# Altium schematic symbol library TC264.SCHLIB: 72 symbols
Pins are listed as number, name and electrical type; pins without a type are passive.

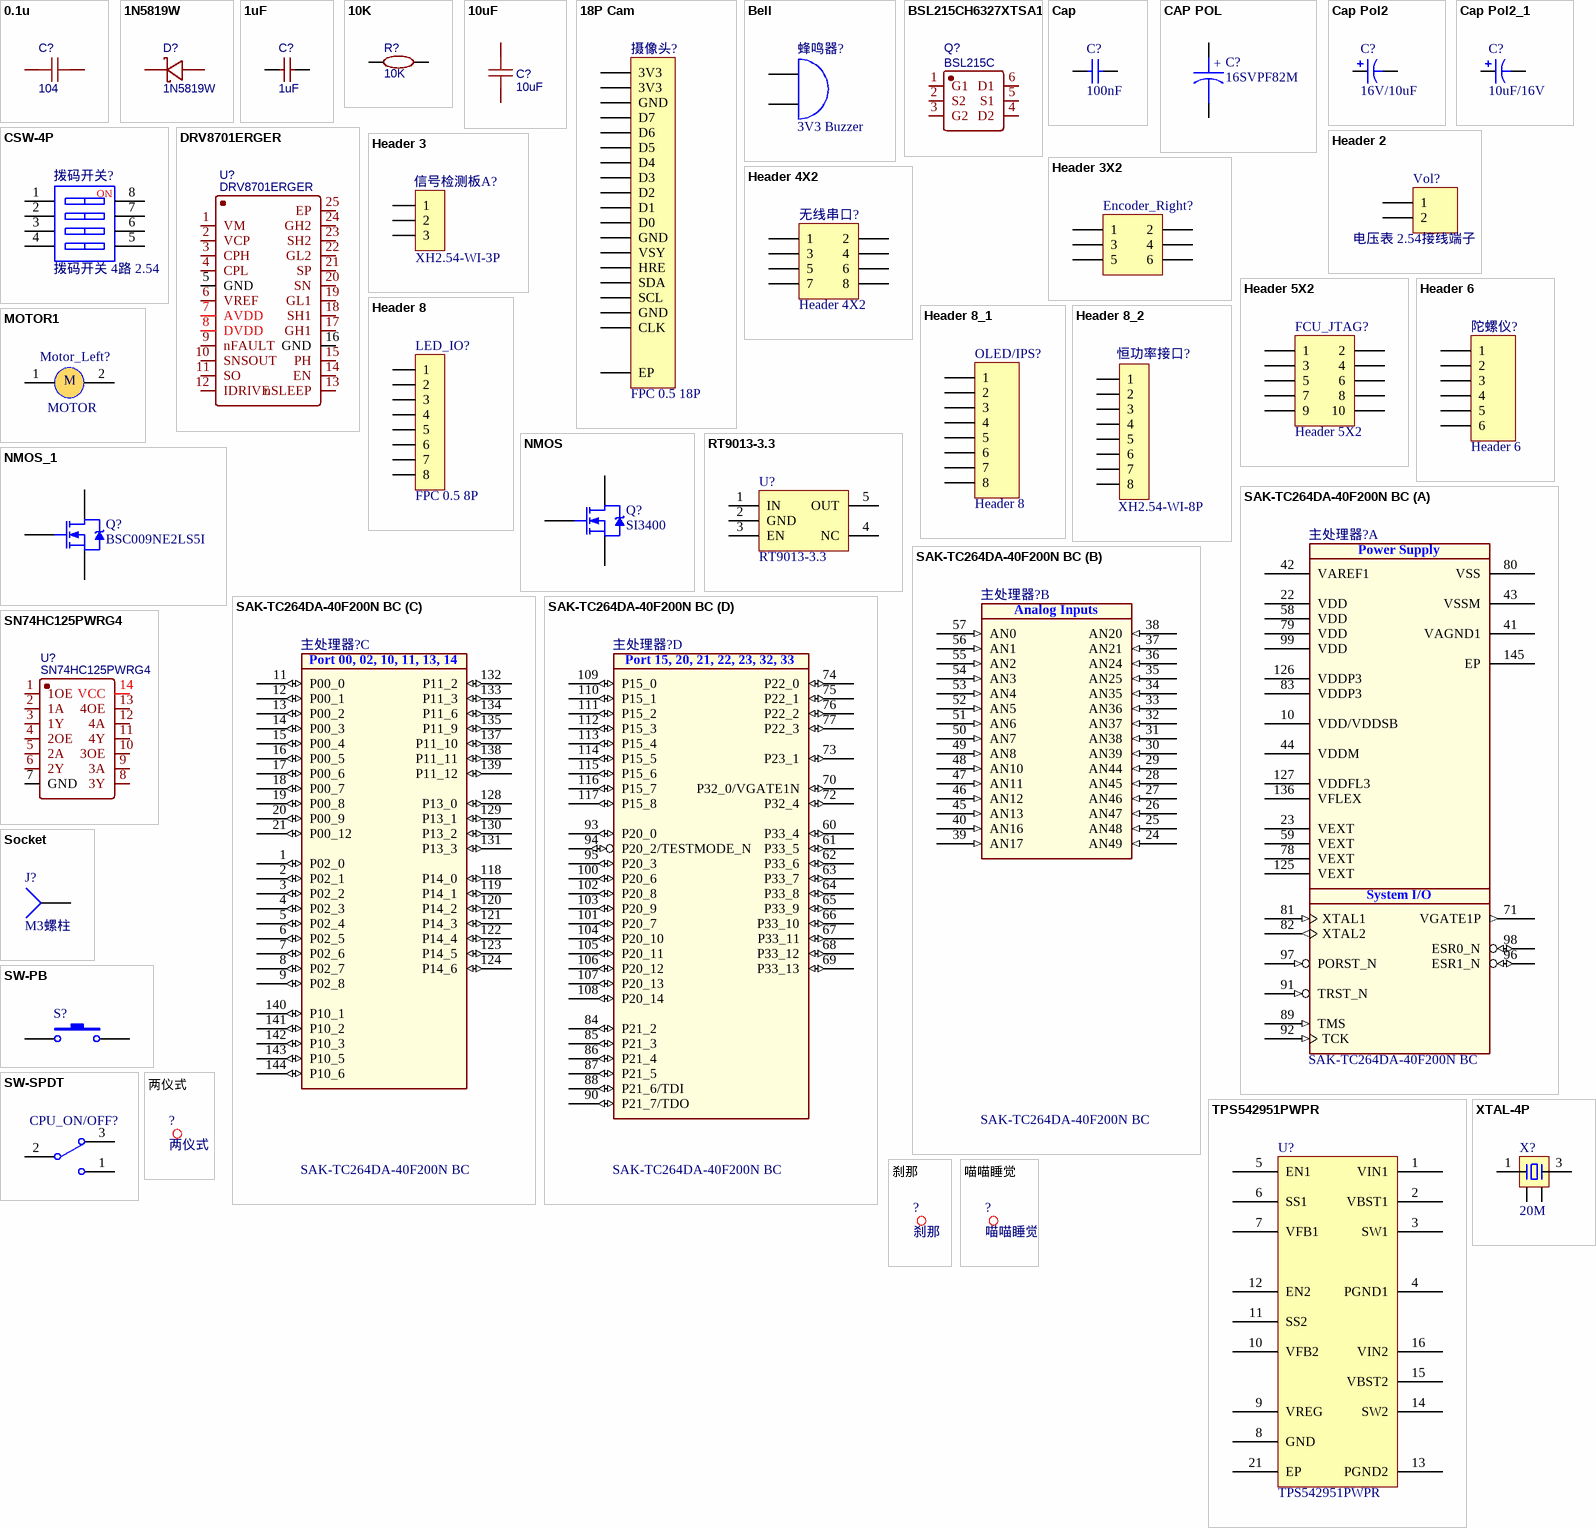
[diagram p0: symbols 0.1u to 喵喵睡觉]

## 0.1u
designator C?, comment 104
nameAlias: Value(F); Contributor: LCEDA_Lib; spicePre: C; spiceSymbolName: C_0603_US
footprint C0603
pins: 1, 2

## 1N5819W
designator D?
BOM_Manufacturer: Shandong Jingdao Microelectronics; Contributor: LCSC; BOM_Supplier: LCSC; BOM_Supplier Part: C169540; BOM_Manufacturer Part: 1N5819W; BOM_JLCPCB Part Class: Extended Part; spicePre: D; spiceSymbolName: 1N5819W
footprint SOD-123F_L2.8-W1.8-LS3.7-RD
pins: 1, 2

## 1uF
designator C?
BOM_Manufacturer Part: CL10B105KO8NNNC; BOM_Manufacturer: SAMSUNG; nameAlias: Capacitance; BOM_Supplier: LCSC; BOM_Supplier Part: C59782; BOM_JLCPCB Part Class: Extended Part; spicePre: C; spiceSymbolName: CL10B105KO8NNNC
footprint C0603
pins: 1, 2

## 10K
designator R?
BOM_Manufacturer: YAGEO; BOM_Manufacturer Part: RT0603BRD0710KL; nameAlias: Resistance (Ohms); Resistance: 10kΩ; BOM_Supplier: LCSC; BOM_Supplier Part: C95204; BOM_JLCPCB Part Class: Extended Part; spicePre: R; spiceSymbolName: RT0603BRD0710KL
footprint R0603
pins: 1, 2

## 10uF
designator C?
BOM_Manufacturer: Huaxin S&T; BOM_Manufacturer Part: 0805F106Z160CT; nameAlias: Capacitance; Contributor: LCSC; BOM_Supplier: LCSC; BOM_Supplier Part: C303921; BOM_JLCPCB Part Class: Extended Part; spicePre: C; spiceSymbolName: 0805F106Z160CT
footprint C0805
pins: 1, 2

## 18P Cam
designator 摄像头?, comment FPC 0.5 18P
Header, 25-Pin; LatestRevisionDate: 17-Jul-2002; LatestRevisionNote: Re-released for DXP Platform.; Publisher: Altium Limited
signal-integrity model Connector
footprint FPC0.5 2H-WS-18P (长：13.2mm，宽：5.2mm，高：2mm)
footprint FPC0.5 2H-WS-18P (长：13.2mm，宽：5.2mm，高：2mm)
pins: 0 EP, 1 3V3, 2 3V3, 3 GND, 4 D7, 5 D6, 6 D5, 7 D4, 8 D3, 9 D2, 10 D1, 11 D0, 12 GND, 13 VSY, 14 HRE, 15 SDA, 16 SCL, 17 GND, 18 CLK

## Bell
designator 蜂鸣器?, comment 3V3 Buzzer
Electrical Bell; Published: 24-Mar-1999; LatestRevisionDate: 17-Jul-2002; LatestRevisionNote: Re-released for DXP Platform.; PackageReference: PIN2; Publisher: Altium Limited
footprint 7.5mm 蜂鸣器
footprint 贴片有源蜂鸣器 9.6x9.6x5
pins: 1 A, 2 B

## BSL215CH6327XTSA1
designator Q?, comment BSL215C
BOM_Manufacturer: Infineon; BOM_Manufacturer Part: BSL215CH6327XTSA1; Contributor: LCSC; BOM_Supplier: LCSC; BOM_Supplier Part: C150914; BOM_JLCPCB Part Class: Extended Part; spicePre: Q; spiceSymbolName: BSL215CH6327XTSA1
footprint TSOP-6_L3.0-W1.5-P0.95-LS2.8-BL
footprint SOT23-6
pins: 1 G1, 2 S2, 3 G2, 4 D2, 5 S1, 6 D1

## Cap
designator C?, comment 100nF
Capacitor; Published: 8-Jun-2000; LatestRevisionDate: 17-Jul-2002; LatestRevisionNote: Re-released for DXP Platform.; PackageReference: RAD-0.3; Publisher: Altium Limited; PackageDescription: Radial Cap, Thru-Hole; 2 Leads; 0.3 in Pin Spacing
simulation model CAP (Capacitor)
signal-integrity model Cap
footprint 0603 电容 C3
pins: 1, 2

## CAP POL
designator C?, comment 16SVPF82M
Capacitor
footprint CT 8*7 - V (直径8mm，高7mm)
footprint CAP 5.0*12.5*20-H - GD (脚距5mm直径12.5mm高度20mm)
footprint CAP 3.5*8*11.5 - BK (脚距3.5mm直径8mm高度11.5mm)
footprint CAP 2.5*6.3*11.2 (脚距2.5mm直径6.3mm高度11.2mm)
pins: 1, 2
text: +

## Cap Pol2
designator C?, comment value 16V/10uF  (hidden comment: 10UF)
Polarized Capacitor (Axial); Published: 8-Jun-2000; LatestRevisionDate: 17-Jul-2002; LatestRevisionNote: Re-released for DXP Platform.; PackageReference: POLAR0.8; Publisher: Altium Limited; PackageDescription: Polarized Capacitor; 2 Leads
simulation model CAP (Capacitor)
signal-integrity model Cap Pol
footprint 0603 电容 C3
footprint C0805
pins: 1, 2
1 alternate drawing of the same symbol

## Cap Pol2_1
designator C?, comment 10UF  (value not drawn)
Polarized Capacitor (Axial); Published: 8-Jun-2000; LatestRevisionDate: 17-Jul-2002; LatestRevisionNote: Re-released for DXP Platform.; PackageReference: POLAR0.8; Publisher: Altium Limited; PackageDescription: Polarized Capacitor; 2 Leads
simulation model CAP (Capacitor)
signal-integrity model Cap Pol
footprint 0603 电容 C3
footprint C0805
pins: 1, 2
1 alternate drawing of the same symbol
text: 10uF/16V

## CSW-4P
designator 拨码开关?, comment 拨码开关 4路 2.54
4路编码开关; 版权归属: 源创客; BOM名称: 4路编码开关; 学习资源: www.ooocke.com
footprint CSW DIP-2P_G (6.6*9.9*7mm)
pins: 1, 2, 3, 4, 5, 6, 7, 8
text: NO

## DRV8701ERGER
designator U?
BOM_Manufacturer: Texas Instruments; Contributor: LCSC; BOM_Supplier: LCSC; BOM_Supplier Part: C90964; BOM_Manufacturer Part: DRV8701ERGER; BOM_JLCPCB Part Class: Extended Part; spicePre: U; spiceSymbolName: DRV8701ERGER
footprint VQFN-24_L4.0-W4.0-P0.50-BL-EP2.8
pins: 1 VM, 2 VCP, 3 CPH, 4 CPL, 5 GND, 6 VREF, 7 AVDD, 8 DVDD, 9 nFAULT, 10 SNSOUT, 11 SO, 12 IDRIVE, 13 nSLEEP, 14 EN, 15 PH, 16 GND, 17 GH1, 18 SH1, 19 GL1, 20 SN, 21 SP, 22 GL2, 23 SH2, 24 GH2, 25 EP

## Header 2
designator Vol?, comment 电压表 2.54接线端子
Header, 2-Pin; LatestRevisionDate: 17-Jul-2002; LatestRevisionNote: Re-released for DXP Platform.; Publisher: Altium Limited
signal-integrity model Connector
footprint XH2.54-LI-2P (接插件，2P)
pins: 1, 2

## Header 3
designator 信号检测板A?, comment XH2.54-WI-3P
3P接插件; 版权归属: 封装库来自淘宝 ID：黄晶宝石; BOM名称: 3P接插件; 学习资源: https://shop463601444.taobao.com
footprint XH2.54-WI-3P (接插件，3P)
footprint XH2.54-LI-3P (接插件，3P)
footprint HDR2.54-LI-3P (排针，3脚)
footprint HDR2.54-M-LI-3P (排母，3脚)
footprint HDR2.54-WI-3P (弯脚排针，3脚)
footprint HDR2.54-WS-3P (3P卧式贴片排针2.54)
footprint HDR2.54-Y-LI-3P (圆孔排母，3脚)
footprint HDR2.54-M-WS-3P (3P卧式贴片排母2.54)
footprint KF2510-LI-3P (接插件/2A)
footprint XH2.54-WS-3P (长：12.5mm，宽：8mm，高：6.1mm)
footprint XH2.54-LS-3P (长：12.5mm，宽：6mm，高：8.3mm)
footprint KF2EDGK-2.54-LI-3P (长：9.52mm，宽：8.1mm，高：10.1mm)
footprint KF2EDGK-2.54-WI-3P (长：9.52mm，宽：10.1mm，高：8.1mm)
pins: 1, 2, 3

## Header 3X2
designator Encoder_Right?  (value not drawn)
Header, 3-Pin, Dual row; LatestRevisionDate: 17-Jul-2002; LatestRevisionNote: Re-released for DXP Platform.; Publisher: Altium Limited
signal-integrity model Connector
footprint 2.54mm 6P 简易牛角座 (立式直插简牛插座，间距2.54（蒜米工坊）)
footprint DC-2.54-L-Z-6P (立式直插简牛插座，间距2.54（蒜米工坊）)
pins: 1, 2, 3, 4, 5, 6

## Header 4X2
designator 无线串口?
Header, 4-Pin, Dual row; LatestRevisionDate: 17-Jul-2002; LatestRevisionNote: Re-released for DXP Platform.; Publisher: Altium Limited
signal-integrity model Connector
footprint 2.54mm 4P*2排母 (排母，4脚)
pins: 1, 2, 3, 4, 5, 6, 7, 8

## Header 5X2
designator FCU_JTAG?
Header, 5-Pin, Dual row; LatestRevisionDate: 17-Jul-2002; LatestRevisionNote: Re-released for DXP Platform.; Publisher: Altium Limited
signal-integrity model Connector
footprint DC-2.54-L-Z-10P (立式直插简牛插座，间距2.54（蒜米工坊）)
pins: 1, 2, 3, 4, 5, 6, 7, 8, 9, 10

## Header 6
designator 陀螺仪?
Header, 6-Pin; LatestRevisionDate: 17-Jul-2002; LatestRevisionNote: Re-released for DXP Platform.; Publisher: Altium Limited
signal-integrity model Connector
footprint MX 1.25-WS-6P (长：12.65mm，宽：4.2mm，高：3.4mm)
pins: 1, 2, 3, 4, 5, 6

## Header 8
designator LED_IO?, comment FPC 0.5 8P
8P接插件; 版权归属: 封装库来自淘宝 ID：黄晶宝石; BOM名称: 8P接插件; 学习资源: https://shop463601444.taobao.com
footprint XH2.54-WI-8P (接插件，8P)
footprint XH2.54-LI-8P (接插件，8P)
footprint HDR2.54-LI-8P (排针，8脚)
footprint HDR2.54-M-LI-8P (排母，8脚)
footprint HDR2.54-WI-8P (弯脚排针，8脚)
footprint HDR2.54-WS-8P (8P卧式贴片排针2.54)
footprint HDR2.54-Y-LI-8P (圆孔排母，8脚)
footprint HDR2.54-M-WS-8P (8P卧式贴片排母2.54)
footprint KF2510-LI-8P (接插件/2A)
footprint XH2.54-WS-8P (长：25mm，宽：8mm，高：6.1mm)
footprint XH2.54-LS-8P (长：25mm，宽：6mm，高：8.3mm)
footprint KF2EDGK-2.54-LI-8P (长：22.22mm，宽：8.1mm，高：10.1mm)
footprint KF2EDGK-2.54-WI-8P (长：22.22mm，宽：10.1mm，高：8.1mm)
footprint FPC0.5 2H-WS-8P (长：8.2mm，宽：5.2mm，高：2mm 淘宝ID:黄晶宝石   店铺网址:https://shop463601444.taobao.com)
pins: 1, 2, 3, 4, 5, 6, 7, 8

## Header 8_1
designator OLED/IPS?, comment Header 8
Header, 8-Pin; LatestRevisionDate: 17-Jul-2002; LatestRevisionNote: Re-released for DXP Platform.; Publisher: Altium Limited
signal-integrity model Connector
footprint HDR2.54-LI-8P (排针，8脚)
pins: 1, 2, 3, 4, 5, 6, 7, 8

## Header 8_2
designator 恒功率接口?, comment XH2.54-WI-8P
8P接插件; 版权归属: 封装库来自淘宝 ID：黄晶宝石; BOM名称: 8P接插件; 学习资源: https://shop463601444.taobao.com
footprint XH2.54-WI-8P (接插件，8P)
footprint XH2.54-LI-8P (接插件，8P)
footprint HDR2.54-LI-8P (排针，8脚)
footprint HDR2.54-M-LI-8P (排母，8脚)
footprint XH2.54-WI-8P (接插件，8P)
footprint HDR2.54-WS-8P (8P卧式贴片排针2.54)
footprint HDR2.54-Y-LI-8P (圆孔排母，8脚)
footprint HDR2.54-M-WS-8P (8P卧式贴片排母2.54)
footprint KF2510-LI-8P (接插件/2A)
footprint XH2.54-WS-8P (长：25mm，宽：8mm，高：6.1mm)
footprint XH2.54-LS-8P (长：25mm，宽：6mm，高：8.3mm)
footprint KF2EDGK-2.54-LI-8P (长：22.22mm，宽：8.1mm，高：10.1mm)
footprint KF2EDGK-2.54-WI-8P (长：22.22mm，宽：10.1mm，高：8.1mm)
pins: 1, 2, 3, 4, 5, 6, 7, 8

## MOTOR1
designator Motor_Left?, comment MOTOR
footprint 5.08 2P 螺钉端子 (Terminal Block, 17.5A 400V, Pitch 5.08mm, 2 Positions, Screw Connection)
footprint XT30 母头 电源插头
pins: 1 (power), 2 (power)
text: M

## NMOS
designator Q?, comment SI3400
N-Channel Power MOSFET 40V 100A 1.8mΩ; Note: Pin 2 is electrically connected to pin 4.; Published: 8-Jun-2000; LatestRevisionDate: 17-Jul-2002; LatestRevisionNote: Re-released for DXP Platform.; DatasheetVersion: PD-9.814; PackageVersion: Feb-1997; PackageReference: TO-220AB; Publisher: Altium Limited; PackageDescription: TO, Thru-Hole, Vertical, Heatsink Mounted; 3 In-Line Leads; Pitch 2.54 mm; ComponentLink1Description: Manufacturer Link; ComponentLink1URL: http://www.irf.com/
simulation model IRF1010 (Spice Subcircuit)
footprint PSON-8 MOS
footprint SOT-23
pins: 1 G, 2 S, 3 D

## NMOS_1
designator Q?, comment BSC009NE2LS5I
N-Channel Power MOSFET 40V 100A 1.8mΩ; Note: Pin 2 is electrically connected to pin 4.; Published: 8-Jun-2000; LatestRevisionDate: 17-Jul-2002; LatestRevisionNote: Re-released for DXP Platform.; DatasheetVersion: PD-9.814; PackageVersion: Feb-1997; PackageReference: TO-220AB; Publisher: Altium Limited; PackageDescription: TO, Thru-Hole, Vertical, Heatsink Mounted; 3 In-Line Leads; Pitch 2.54 mm; ComponentLink1Description: Manufacturer Link; ComponentLink1URL: http://www.irf.com/
simulation model IRF1010 (Spice Subcircuit)
footprint PSON-8 MOS
footprint PSON-8 MOS
pins: 1 S, 2 G, 3 D

## RT9013-3.3
designator U?
3.3V电源芯片
footprint SOT23-5N (3x1.6x1.1mm(长宽高))
pins: 1 IN, 2 GND, 3 EN, 4 NC, 5 OUT

## SAK-TC264DA-40F200N BC
designator 主处理器?
32-Bit Single-Chip Microcontroller BC-Step; Manufacturer: Infineon Technologies; PackageReference: PG-LQFP-144-22; ManufacturerPartNumber: SAK-TC264DA-40F200N BC
footprint QFP144_EP (QFP,0.50mm pitch,square;144 pin,20.00mm L X 20.00mm W X 1.60mm H body (w/thermal tab))
part A pins: 10 VDD/VDDSB (power) "Emulation Device: Emulation SRAM Standby Power Supply (1.3V)", 22 VDD (power) "Digital Core Power Supply (1.3V)", 23 VEXT (power) "External Supply (5V / 3.3V)", 41 VAGND1 (power) "Negative Analog Reference Voltage 1", 42 VAREF1 (power) "Positive Analog Reference Voltage 1", 43 VSSM (power) "Analog Ground for VDDM", 44 VDDM (power) "ADC Analog Power Supply (3.3V / 5V)", 58 VDD (power) "Digital Core Power Supply (1.3V)", 59 VEXT (power) "External Supply (5V / 3.3V)", 71 VGATE1P (out) "External Pass Device gate control for EVR13", 78 VEXT (power) "External Supply (5V / 3.3V)", 79 VDD (power) "Digital Core Power Supply (1.3V)", 80 VSS (power) "Digital Ground", 81 XTAL1 (in) "Main Oscillator/PLL/Clock Generator Input", 82 XTAL2 (out) "Main Oscillator/PLL/Clock Generator Output", 83 VDDP3 (power) "Digital Power Supply for Oscillator, LVDSH and A2 pads (3.3V)", 89 TMS (in) "JTAG Module State Machine Control Input", 91 TRST_N (in) "JTAG Module Reset/Enable Input", 92 TCK (in) "JTAG Module Clock Input", 96 ESR1_N (io) "External System Request Reset 1", 97 PORST_N (in) "Power On Reset Input", 98 ESR0_N (io) "External System Request Reset 0", 99 VDD (power) "Digital Core Power Supply (1.3V)", 125 VEXT (power) "External Supply (5V / 3.3V)", 126 VDDP3 (power) "Digital Power Supply for Flash (3.3V)", 127 VDDFL3 (power) "Flash Power Supply (3.3V)", 136 VFLEX (power) "Digital Power Supply for Flex Port Pads (5V / 3.3V)", 145 EP (power) "Exposed Pad"
part B pins: 24 AN49 (in) "Analog input 49", 25 AN48 (in) "Analog input 48", 26 AN47 (in) "Analog input 47", 27 AN46 (in) "Analog input 46", 28 AN45 (in) "Analog input 45", 29 AN44 (in) "Analog input 44", 30 AN39 (in) "Analog input 39", 31 AN38 (in) "Analog input 38", 32 AN37 (in) "Analog input 37", 33 AN36 (in) "Analog input 36", 34 AN35 (in) "Analog input 35", 35 AN25 (in) "Analog input 25", 36 AN24 (in) "Analog input 24", 37 AN21 (in) "Analog input 21", 38 AN20 (in) "Analog input 20", 39 AN17 (in) "Analog input 17", 40 AN16 (in) "Analog input 16", 45 AN13 (in) "Analog input 13", 46 AN12 (in) "Analog input 12", 47 AN11 (in) "Analog input 11", 48 AN10 (in) "Analog input 10", 49 AN8 (in) "Analog input 8", 50 AN7 (in) "Analog input 7", 51 AN6 (in) "Analog input 6", 52 AN5 (in) "Analog input 5", 53 AN4 (in) "Analog input 4", 54 AN3 (in) "Analog input 3", 55 AN2 (in) "Analog input 2", 56 AN1 (in) "Analog input 1", 57 AN0 (in) "Analog input 0"
part C pins: 1 P02_0 (io) "General-purpose Input/Output", 2 P02_1 (io) "General-purpose Input/Output", 3 P02_2 (io) "General-purpose Input/Output", 4 P02_3 (io) "General-purpose Input/Output", 5 P02_4 (io) "General-purpose Input/Output", 6 P02_5 (io) "General-purpose Input/Output", 7 P02_6 (io) "General-purpose Input/Output", 8 P02_7 (io) "General-purpose Input/Output", 9 P02_8 (io) "General-purpose Input/Output", 11 P00_0 (io) "General-purpose Input/Output", 12 P00_1 (io) "General-purpose Input/Output", 13 P00_2 (io) "General-purpose Input/Output", 14 P00_3 (io) "General-purpose Input/Output", 15 P00_4 (io) "General-purpose Input/Output", 16 P00_5 (io) "General-purpose Input/Output", 17 P00_6 (io) "General-purpose Input/Output", 18 P00_7 (io) "General-purpose Input/Output", 19 P00_8 (io) "General-purpose Input/Output", 20 P00_9 (io) "General-purpose Input/Output", 21 P00_12 (io) "General-purpose Input/Output", 118 P14_0 (io) "General-purpose Input/Output", 119 P14_1 (io) "General-purpose Input/Output", 120 P14_2 (io) "General-purpose Input/Output", 121 P14_3 (io) "General-purpose Input/Output", 122 P14_4 (io) "General-purpose Input/Output", 123 P14_5 (io) "General-purpose Input/Output", 124 P14_6 (io) "General-purpose Input/Output", 128 P13_0 (io) "General-purpose Input/Output", 129 P13_1 (io) "General-purpose Input/Output", 130 P13_2 (io) "General-purpose Input/Output", 131 P13_3 (io) "General-purpose Input/Output", 132 P11_2 (io) "General-purpose Input/Output", 133 P11_3 (io) "General-purpose Input/Output", 134 P11_6 (io) "General-purpose Input/Output", 135 P11_9 (io) "General-purpose Input/Output", 137 P11_10 (io) "General-purpose Input/Output", 138 P11_11 (io) "General-purpose Input/Output", 139 P11_12 (io) "General-purpose Input/Output", 140 P10_1 (io) "General-purpose Input/Output", 141 P10_2 (io) "General-purpose Input/Output", 142 P10_3 (io) "General-purpose Input/Output", 143 P10_5 (io) "General-purpose Input/Output", 144 P10_6 (io) "General-purpose input/output"
part D pins: 60 P33_4 (io) "General-purpose Input/Output", 61 P33_5 (io) "General-purpose Input/Output", 62 P33_6 (io) "General-purpose Input/Output", 63 P33_7 (io) "General-purpose Input/Output", 64 P33_8 (io) "General-purpose Input/Output", 65 P33_9 (io) "General-purpose Input/Output", 66 P33_10 (io) "General-purpose Input/Output", 67 P33_11 (io) "General-purpose Input/Output", 68 P33_12 (io) "General-purpose Input/Output", 69 P33_13 (io) "General-purpose Input/Output", 70 P32_0/VGATE1N (io) "General-purpose Input/Output/SMPS mode: Analog Output", 72 P32_4 (io) "General-purpose Input/Output", 73 P23_1 (io) "General-purpose Input/Output", 74 P22_0 (io) "General-purpose Input/Output", 75 P22_1 (io) "General-purpose Input/Output", 76 P22_2 (io) "General-purpose Input/Output", 77 P22_3 (io) "General-purpose Input/Output", 84 P21_2 (io) "General-purpose Input/Output", 85 P21_3 (io) "General-purpose Input/Output", 86 P21_4 (io) "General-purpose Input/Output", 87 P21_5 (io) "General-purpose Input/Output", 88 P21_6/TDI (io) "General-purpose Input/Output/OCDS (JTAG) Input", 90 P21_7/TDO (io) "General-purpose Input/Output/OCDS (JTAG)", 93 P20_0 (io) "General-purpose Input/Output", 94 P20_2/TESTMODE_N (io) "General-purpose Input/Output/OCDS Input", 95 P20_3 (io) "General-purpose Input/Output", 100 P20_6 (io) "General-purpose Input/Output", 101 P20_7 (io) "General-purpose Input/Output", 102 P20_8 (io) "General-purpose Input/Output", 103 P20_9 (io) "General-purpose Input/Output", 104 P20_10 (io) "General-purpose Input/Output", 105 P20_11 (io) "General-purpose Input/Output", 106 P20_12 (io) "General-purpose Input/Output", 107 P20_13 (io) "General-purpose Input/Output", 108 P20_14 (io) "General-purpose Input/Output", 109 P15_0 (io) "General-purpose Input/Output", 110 P15_1 (io) "General-purpose Input/Output", 111 P15_2 (io) "General-purpose Input/Output", 112 P15_3 (io) "General-purpose Input/Output", 113 P15_4 (io) "General-purpose Input/Output", 114 P15_5 (io) "General-purpose Input/Output", 115 P15_6 (io) "General-purpose Input/Output", 116 P15_7 (io) "General-purpose Input/Output", 117 P15_8 (io) "General-purpose Input/Output"
part A text: Power Supply; System I/O
part B text: Analog Inputs
part C text: Port 00, 02, 10, 11, 13, 14
part D text: Port 15, 20, 21, 22, 23, 32, 33

## SN74HC125PWRG4
designator U?
BOM_Manufacturer: TI(德州仪器); Contributor: LCSC; BOM_Supplier: LCSC; BOM_Supplier Part: C2676184; BOM_Manufacturer Part: SN74HC125PWRG4; BOM_JLCPCB Part Class: Extended Part; spicePre: U; spiceSymbolName: SN74HC125PWRG4
footprint TSSOP-14_L5.0-W4.4-P0.65-LS6.4-TL
pins: 1 1OE, 2 1A, 3 1Y, 4 2OE, 5 2A, 6 2Y, 7 GND, 8 3Y, 9 3A, 10 3OE, 11 4Y, 12 4A, 13 4OE, 14 VCC

## Socket
designator J?, comment M3螺柱
Socket; LatestRevisionDate: 17-Jul-2002; LatestRevisionNote: Re-released for DXP Platform.; Publisher: Altium Limited
signal-integrity model Connector
footprint MTGP720H320V6P - duplicate
pins: 1

## SW-PB
designator S?  (value not drawn)
Switch; Published: 24-Mar-1999; LatestRevisionDate: 17-Jul-2002; LatestRevisionNote: Re-released for DXP Platform.; PackageReference: SPST-2; Publisher: Altium Limited; PackageDescription: Switch; 2 Leads
footprint TSW SMD-3*6*2.5 (3*6*2.5mm)
pins: 1, 2

## SW-SPDT
designator CPU_ON/OFF?  (value not drawn)
SPDT Subminiature Toggle Switch, Right Angle Mounting, Vertical Actuation; Published: 24-Mar-1999; LatestRevisionDate: 17-Dec-2003; LatestRevisionNote: Schematic revised, PCB Footprint replaced.; DatasheetVersion: 05-Dec-2000; PackageReference: TL36WW15050; Publisher: Altium Limited; PackageDescription: Switch; 4 Leads; ComponentLink1Description: Manufacturer Link; ComponentLink1URL: http://www.apem.com
footprint MTS-102S 两档纽子开关 (MTS10系列3脚扭子开关)
pins: 1, 2, 3

## TPS542951PWPR
designator U?
footprint SSOP16_EP (6.3*7.7*1.6mm（长宽高）)
pins: 1 VIN1, 2 VBST1, 3 SW1, 4 PGND1, 5 EN1, 6 SS1, 7 VFB1, 8 GND, 9 VREG, 10 VFB2, 11 SS2, 12 EN2, 13 PGND2, 14 SW2, 15 VBST2, 16 VIN2, 21 EP

## XTAL-4P
designator X?, comment 20M
4脚无源晶振; 版权归属: 源创客; BOM名称: 4脚无源晶振; 学习资源: www.ooocke.com
footprint OSC 3225-4P (3.2*2.5*0.7mm(长宽高))
pins: 1, 2, 3, 4

## 两仪式
designator ?
footprint 两仪式
footprint 两仪式

## 刹那
designator ?
footprint 刹那

## 喵喵睡觉
designator ?
footprint 喵喵睡觉

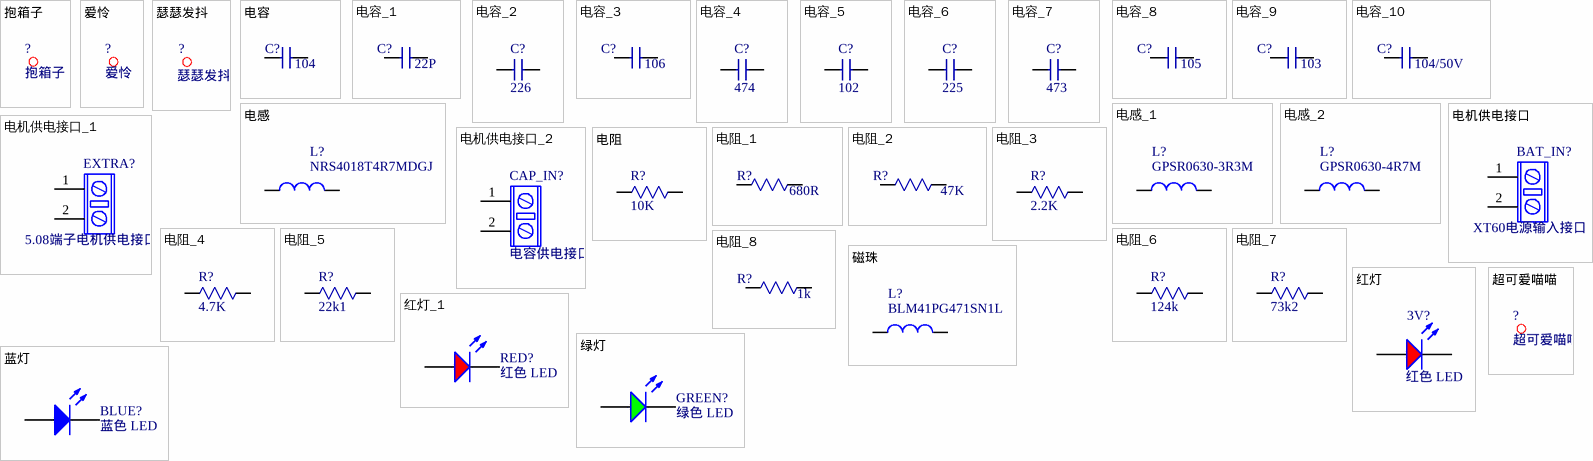
[diagram p1: symbols 抱箱子 to 超可爱喵喵]

## 抱箱子
designator ?
footprint 抱箱子_大
footprint 抱箱子_小

## 爱怜
designator ?
footprint 爱怜

## 瑟瑟发抖
designator ?
footprint IMPORTED_IMAGE - duplicate6

## 电容
designator C?, comment 104
footprint C0402
footprint C0603
footprint C0805
footprint C1206
footprint C1210
footprint C1812 (无极性贴片电容)
footprint C2220 (无极性贴片电容)
pins: 1, 2

## 电容_1
designator C?, comment 22P
footprint C0402
footprint C0603
footprint C0805
footprint C1206
footprint C1210
footprint C1812 (无极性贴片电容)
footprint C2220 (无极性贴片电容)
pins: 1, 2

## 电容_2
designator C?, comment 226
footprint C0402
footprint C0603
footprint C0805
footprint C1206
footprint C1210
footprint C1812 (无极性贴片电容)
footprint C2220 (无极性贴片电容)
pins: 1, 2

## 电容_3
designator C?, comment 106
footprint C0402
footprint C0603
footprint C0805
footprint C1206
footprint C1210
footprint C1812 (无极性贴片电容)
footprint C2220 (无极性贴片电容)
pins: 1, 2

## 电容_4
designator C?, comment 474
footprint C0402
footprint C0603
footprint C0805
footprint C1206
footprint C1210
footprint C1812 (无极性贴片电容)
footprint C2220 (无极性贴片电容)
pins: 1, 2

## 电容_5
designator C?, comment 102
footprint C0402
footprint C0603
footprint C0805
footprint C1206
footprint C1210
footprint C1812 (无极性贴片电容)
footprint C2220 (无极性贴片电容)
pins: 1, 2

## 电容_6
designator C?, comment 225
footprint C0402
footprint C0603
footprint C0805
footprint C1206
footprint C1210
footprint C1812 (无极性贴片电容)
footprint C2220 (无极性贴片电容)
pins: 1, 2

## 电容_7
designator C?, comment 473
footprint C0402
footprint C0603
footprint C0805
footprint C1206
footprint C1210
footprint C1812 (无极性贴片电容)
footprint C2220 (无极性贴片电容)
pins: 1, 2

## 电容_8
designator C?, comment 105
footprint C0402
footprint C0603
footprint C0805
footprint C1206
footprint C1210
footprint C1812 (无极性贴片电容)
footprint C2220 (无极性贴片电容)
pins: 1, 2

## 电容_9
designator C?, comment 103
footprint C0402
footprint C0603
footprint C0805
footprint C1206
footprint C1210
footprint C1812 (无极性贴片电容)
footprint C2220 (无极性贴片电容)
pins: 1, 2

## 电容_10
designator C?, comment 104/50V
footprint C0402
footprint C0603
footprint C0805
footprint C1206
footprint C1210
footprint C1812 (无极性贴片电容)
footprint C2220 (无极性贴片电容)
pins: 1, 2

## 电感
designator L?, comment NRS4018T4R7MDGJ
footprint L 0402 (小功率贴片电感)
footprint L 0603 (小功率贴片电感)
footprint L 0805 (小功率贴片电感)
footprint CDRH127 (12*12*8mm（长宽高）)
footprint SWPA4030S (轮廓4mm*4mm ，焊盘间距1.9mm（蒜米工坊）)
footprint CD54 (5.8*5.2*4.5mm（长宽高）)
footprint L 0630 (6.6mm*7.2mm*3mm)
pins: 1, 2

## 电感_1
designator L?, comment GPSR0630-3R3M
footprint L 0402 (小功率贴片电感)
footprint L 0603 (小功率贴片电感)
footprint L 0805 (小功率贴片电感)
footprint CDRH127 (12*12*8mm（长宽高）)
footprint SWPA4030S (轮廓4mm*4mm ，焊盘间距1.9mm（蒜米工坊）)
footprint CD54 (5.8*5.2*4.5mm（长宽高）)
footprint L 0630 (6.6mm*7.2mm*3mm)
pins: 1, 2

## 电感_2
designator L?, comment GPSR0630-4R7M
footprint L 0402 (小功率贴片电感)
footprint L 0603 (小功率贴片电感)
footprint L 0805 (小功率贴片电感)
footprint CDRH127 (12*12*8mm（长宽高）)
footprint SWPA4030S (轮廓4mm*4mm ，焊盘间距1.9mm（蒜米工坊）)
footprint CD54 (5.8*5.2*4.5mm（长宽高）)
footprint L 0630 (6.6mm*7.2mm*3mm)
pins: 1, 2

## 电机供电接口
designator BAT_IN?, comment XT60电源输入接口
footprint XT60 母头 电源接口
footprint TX60PW-F20 (长：18.8mm， 宽：16mm，高：8.6mm)
footprint TX60PW-M20 (长：18.8mm， 宽：16mm，高：8.6mm     淘宝ID:黄晶宝石)
pins: 1, 2

## 电机供电接口_1
designator EXTRA?, comment 5.08端子电机供电接口
footprint 5.08 螺钉式 2p (Terminal Block, 10A 160V, Pitch 3.5mm, 2 Positions, Screw Connection)
footprint 5.08 2P 螺钉端子 (Terminal Block, 17.5A 400V, Pitch 5.08mm, 2 Positions, Screw Connection)
pins: 1, 2

## 电机供电接口_2
designator CAP_IN?, comment 电容供电接口
footprint XT30 母头 电源插头
footprint XT60 母头 电源接口
footprint 5.08 2P 螺钉端子 (Terminal Block, 17.5A 400V, Pitch 5.08mm, 2 Positions, Screw Connection)
pins: 1, 2

## 电阻
designator R?, comment 10K
footprint R0402
footprint R0603
footprint R0805
footprint R1206
footprint R1210
footprint R1812
footprint R2512 (1W贴片电阻)
footprint 3920_105 锰铜分流器 (SMD, 2-Leads, Body 10x5.2mm)
pins: 1, 2

## 电阻_1
designator R?, comment 680R
footprint R0402
footprint R0603
footprint R0805
footprint R1206
footprint R1210
footprint R1812
footprint R2512 (1W贴片电阻)
footprint 3920_105 锰铜分流器 (SMD, 2-Leads, Body 10x5.2mm)
pins: 1, 2

## 电阻_2
designator R?, comment 47K
footprint R0402
footprint R0603
footprint R0805
footprint R1206
footprint R1210
footprint R1812
footprint R2512 (1W贴片电阻)
footprint 3920_105 锰铜分流器 (SMD, 2-Leads, Body 10x5.2mm)
pins: 1, 2

## 电阻_3
designator R?, comment 2.2K
footprint R0402
footprint R0603
footprint R0805
footprint R1206
footprint R1210
footprint R1812
footprint R2512 (1W贴片电阻)
footprint 3920_105 锰铜分流器 (SMD, 2-Leads, Body 10x5.2mm)
pins: 1, 2

## 电阻_4
designator R?, comment 4.7K
footprint R0402
footprint R0603
footprint R0805
footprint R1206
footprint R1210
footprint R1812
footprint R2512 (1W贴片电阻)
footprint 3920_105 锰铜分流器 (SMD, 2-Leads, Body 10x5.2mm)
pins: 1, 2

## 电阻_5
designator R?, comment 22k1
footprint R0402
footprint R0603
footprint R0805
footprint R1206
footprint R1210
footprint R1812
footprint R2512 (1W贴片电阻)
footprint 3920_105 锰铜分流器 (SMD, 2-Leads, Body 10x5.2mm)
pins: 1, 2

## 电阻_6
designator R?, comment 124k
footprint R0402
footprint R0603
footprint R0805
footprint R1206
footprint R1210
footprint R1812
footprint R2512 (1W贴片电阻)
footprint 3920_105 锰铜分流器 (SMD, 2-Leads, Body 10x5.2mm)
pins: 1, 2

## 电阻_7
designator R?, comment 73k2
footprint R0402
footprint R0603
footprint R0805
footprint R1206
footprint R1210
footprint R1812
footprint R2512 (1W贴片电阻)
footprint 3920_105 锰铜分流器 (SMD, 2-Leads, Body 10x5.2mm)
pins: 1, 2

## 电阻_8
designator R?, comment 1k
footprint R0402
footprint R0603
footprint R0805
footprint R1206
footprint R1210
footprint R1812
footprint R2512 (1W贴片电阻)
footprint 3920_105 锰铜分流器 (SMD, 2-Leads, Body 10x5.2mm)
pins: 1, 2

## 磁珠
designator L?, comment BLM41PG471SN1L
BLM18PG471SN1D
footprint FB0603
footprint FB0805
footprint R1206
pins: 1, 2

## 红灯
designator 3V?, comment 红色 LED
发光二极管; ComponentLink1Description: 供应商链接; ComponentLink1URL: http://www.szlcsc.com/product/details_2668.html; Package: 0805; Supplier: LC; SuppliersPartNumber: C2295
footprint 0603 LED R
footprint 0402-LEDR
pins: 1, 2

## 红灯_1
designator RED?, comment 红色 LED
发光二极管; ComponentLink1Description: 供应商链接; ComponentLink1URL: http://www.szlcsc.com/product/details_2668.html; Package: 0805; Supplier: LC; SuppliersPartNumber: C2295
footprint 0603 LED R
footprint 0402-LEDR
pins: 1, 2

## 绿灯
designator GREEN?, comment 绿色 LED
发光二极管; ComponentLink1Description: 供应商链接; ComponentLink1URL: http://www.szlcsc.com/product/details_2670.html; Package: 0805; Supplier: LC; SuppliersPartNumber: C2297
footprint 0402-LEDG
footprint 0603 LED G (Kingbright,1608,LED,400 mcd 120*)
pins: 1, 2

## 蓝灯
designator BLUE?, comment 蓝色 LED
发光二极管; ComponentLink1Description: 供应商链接; ComponentLink1URL: http://www.szlcsc.com/product/details_2666.html; Package: 0805; Supplier: LC; SuppliersPartNumber: C2293
footprint 0402-LEDB
footprint 0603 LED B
pins: 1, 2

## 超可爱喵喵
designator ?
footprint 喵喵